# Altium footprint library Cole_.PcbLib: 167 footprints (part 3 of 11)
Each footprint in its own frame and in the unit in brackets; x right, y up, seen from the top. Pads: shape width x height; smd on the part's side, far side on the other; paste and mask are expansions set on the pad; w line width, h text height; cw(c..) or ccw(c..) is an arc to the next point about the centre after c.
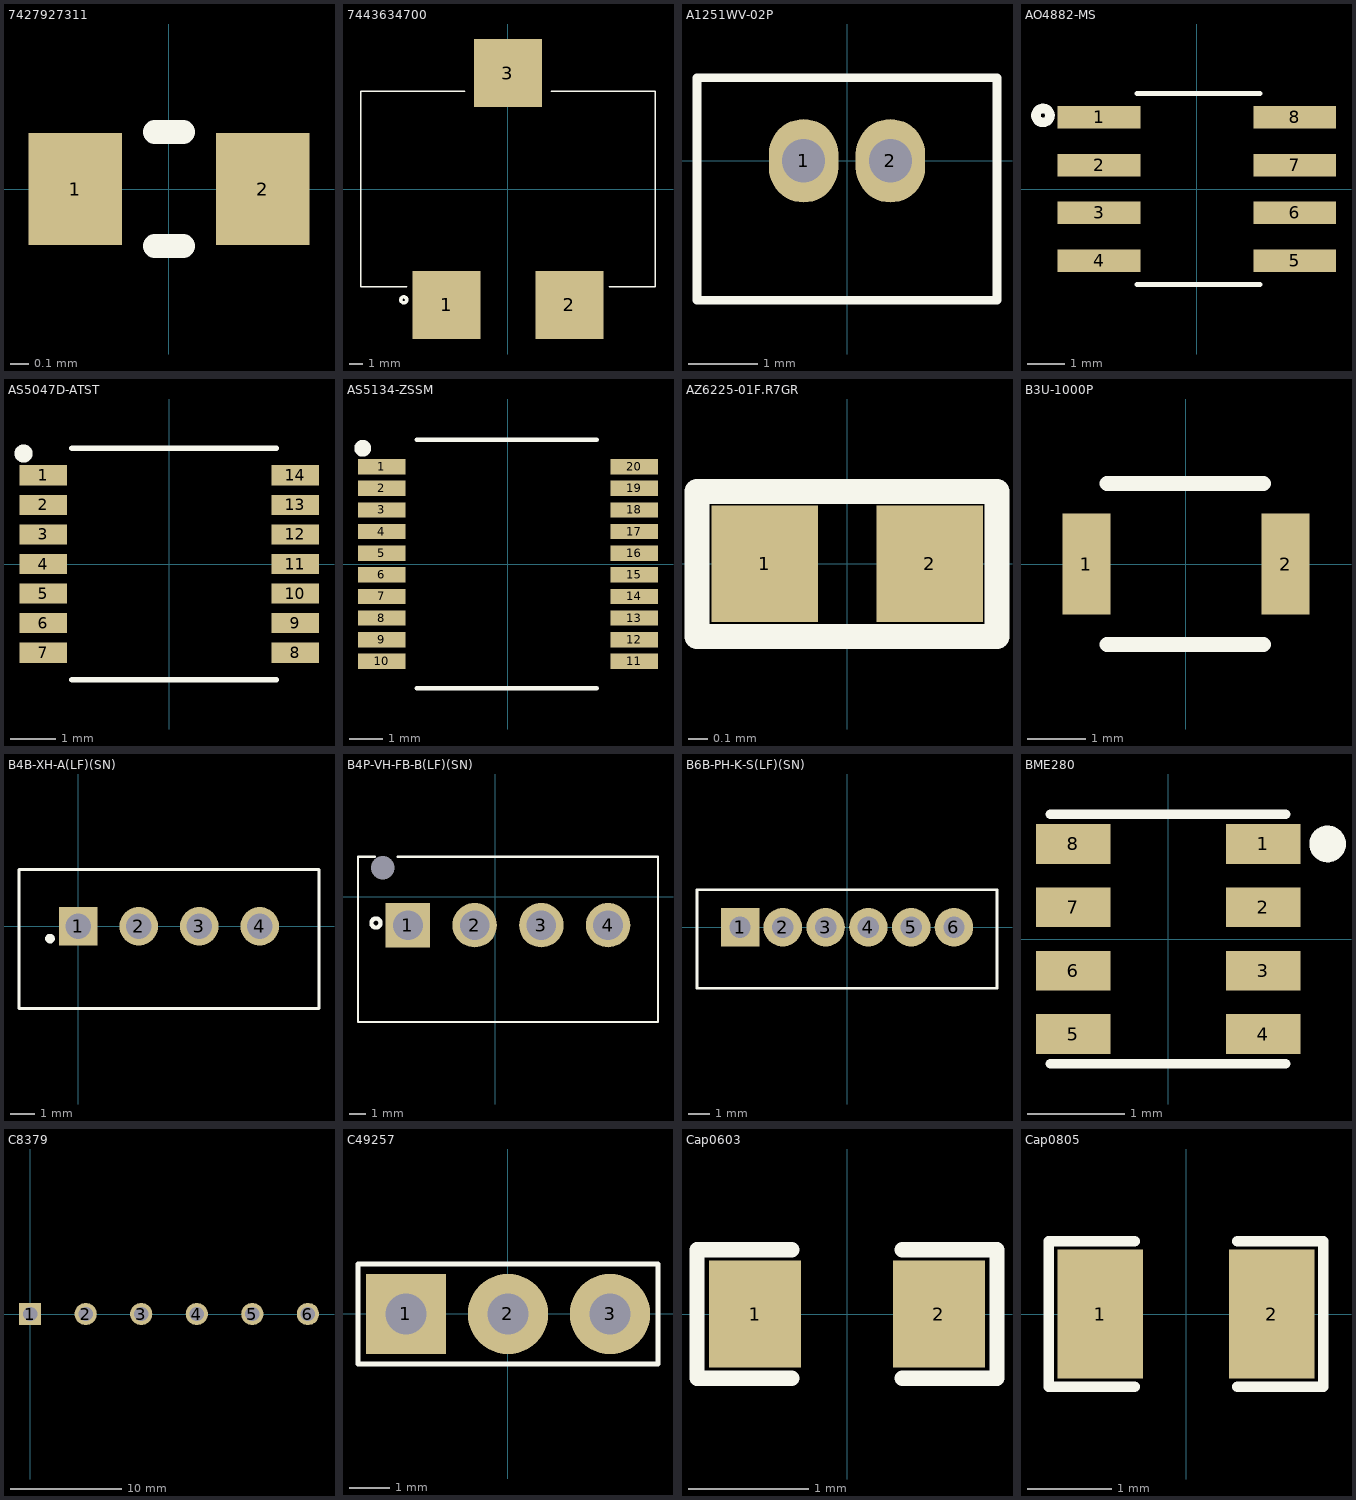
[diagram p2: the footprints below, top view; thin cyan lines are the x and y axes]

## 7427927311 [mm] "FERRITE BEAD 120 OHM 0402 1LN"
pads (2):
  rect 0.5x0.6 smd: 1(-0.5,0) 2(0.5,0)
Top Overlay:
  lines w0.127: -0.076,-0.305 0.076,-0.305 ; -0.076,0.305 0.076,0.305
3D body "74279270_Download_STP_WE-CBF-0402_rev1.stp": height 0.5, standoff 0, extent -0.5,-0.25 0.5,0.25

## 7443634700 [mm]
pads (3):
  rect 5x5 smd mask+0.06: 1(-4.5,-8.5) 2(4.5,-8.5) 3(0,8.5)
Top Overlay:
  circle w0.254: c-7.645,-8.128 r0.217
  lines w0.127: -7.442,-7.163 -10.795,-7.163 -10.795,7.163 -3.175,7.163 ; 3.175,7.163 10.795,7.163 10.795,-7.163 7.442,-7.163
3D body "7443630070_Download_STP_744363xxxx_rev1.stp": height 14, standoff 0, extent -10.75,-10.6 10.75,10.4

## A1251WV-02P [mm]
pads (2):
  oval 1x1.2 hole 0.62: 1(-0.625,0) 2(0.625,0)
Top Overlay:
  lines w0.127: -2.159,-2.007 2.159,-2.007 2.159,1.194 -2.159,1.194 -2.159,-2.007
3D body "A1251WV-02P.STEP": height 4.8, standoff -1.6, extent -2.125,-1.955 2.126,1.195

## AO4882-MS [mm]
pads (8):
  rect 2.2x0.6 smd: 1(-2.6,1.905) 2(-2.6,0.635) 3(-2.6,-0.635) 4(-2.6,-1.905) 5(2.6,-1.905) 6(2.6,-0.635) 7(2.6,0.635) 8(2.6,1.905)
Top Overlay:
  circle w0.254: c-4.09,1.956 r0.186
  lines w0.127: -1.6,-2.54 1.676,-2.54 ; -1.6,2.54 1.676,2.54
3D body "SOP-8L_DIO.step": height 1.75, standoff 0, extent -3.125,-2.475 3.125,2.475

## AS5047D-ATST [mm]
pads (14):
  rect 1.05x0.45 smd: 1(-2.775,1.95) 2(-2.775,1.3) 3(-2.775,0.65) 4(-2.775,0) 5(-2.775,-0.65) 6(-2.775,-1.3) 7(-2.775,-1.95) 8(2.775,-1.95) 9(2.775,-1.3) 10(2.775,-0.65) 11(2.775,0) 12(2.775,0.65) 13(2.775,1.3) 14(2.775,1.95)
Top Overlay:
  circle w0.2: c-3.207,2.433 r0.1
  lines w0.127: -2.14,-2.55 2.36,-2.55 ; -2.14,2.55 2.36,2.55
3D body "User Library-tssop14-2.step": height 1.2, standoff 0, extent -3.2,-2.55 3.2,2.55

## AS5134-ZSSM [mm]
pads (20):
  rect 1.43x0.46 smd: 1(-3.795,2.925) 2(-3.795,2.275) 3(-3.795,1.625) 4(-3.795,0.975) 5(-3.795,0.325) 6(-3.795,-0.325) 7(-3.795,-0.975) 8(-3.795,-1.625) 9(-3.795,-2.275) 10(-3.795,-2.925) 11(3.795,-2.925) 12(3.795,-2.275) 13(3.795,-1.625) 14(3.795,-0.975) 15(3.795,-0.325) 16(3.795,0.325) 17(3.795,0.975) 18(3.795,1.625) 19(3.795,2.275) 20(3.795,2.925)
Top Overlay:
  circle w0.254: c-4.369,3.48 r0.127
  lines w0.127: -2.743,-3.734 2.667,-3.734 ; -2.743,3.734 2.667,3.734
3D body "User Library-SSOP 20 PIN-1.step": height 1.95, standoff -0.04, extent -3.95,-3.665 3.95,3.665

## AZ6225-01F.R7GR [mm] "Bidirectional 2.5V 3.5V 5V 20A (8/20us) DFN1006P2E TVS RoHS"
pads (2):
  rect 0.55x0.6 smd: 1(-0.425,0) 2(0.425,0)
Top Overlay:
  lines w0.127: -0.775,-0.375 0.772,-0.375 0.772,0.372 -0.775,0.372 -0.775,-0.375
3D body "User Library-DFN1006-2.STEP": height 0.48, standoff -0.02, extent -0.5,-0.305 0.5,0.295

## B3U-1000P [mm] "SWITCH TACTILE SPST-NO 0.05A 12V"
pads (2):
  rect 0.82x1.72 smd: 1(-1.7,0) 2(1.7,0)
Top Overlay:
  lines w0.254: -1.346,-1.372 0,-1.372 1.321,-1.372 ; -1.346,1.372 0,1.372 1.321,1.372
3D body "User Library-OMRON B3U1000P.step": height 1.6, standoff 0, extent -2,-1.263 2,1.237

## B4B-XH-A(LF)(SN) [mm]
pads (4):
  rect 1.59x1.59 hole 1.06: 1(0,0)
  round 1.59 hole 1.06: 2(2.5,0) 3(5,0) 4(7.5,0)
Top Overlay:
  circle w0.2: c-1.168,-0.508 r0.1
  lines w0.127: -2.45,-3.4 9.95,-3.4 9.95,2.35 -2.45,2.35 -2.45,-3.4
3D body "step_temp.STEP": height 7, standoff -3.4, extent -2.45,-3.4 9.95,2.35

## B4P-VH-FB-B(LF)(SN) [mm] "CONN HEADER VERT 4POS 3.96MM"
pads (5):
  rect 2.64x2.64 hole 1.76: 1(-5.19,-1.7)
  round 2.64 hole 1.76: 2(-1.23,-1.7) 3(2.73,-1.7) 4(6.69,-1.7)
  round 0 hole 1.397 unplated: 20(-6.69,1.7)
Top Overlay:
  circle w0.254: c-7.087,-1.575 r0.27
  lines w0.127: -7.163,2.362 -8.153,2.362 -8.153,-7.442 9.653,-7.442 9.653,2.362 -5.791,2.362
3D body "b4p-vh-fb-b(lf)(sn) color.STEP": height 11, standoff -3.7, extent -8.123,-7.391 9.597,2.309

## B6B-PH-K-S(LF)(SN) [mm]
pads (6):
  rect 1.8x1.8 hole 1: 1(-5,0)
  round 1.8 hole 1: 2(-3,0) 3(-1,0) 4(1,0) 5(3,0) 6(5,0)
Top Overlay:
  lines w0.127: -7.01,-2.845 7.01,-2.845 7.01,1.753 -7.01,1.753 -7.01,-2.845
3D body "User Library-b6b-ph-ks.step": height 6, standoff -3, extent -6.95,-2.794 6.95,1.706

## BME280 [mm] "Humidity, Pressure, Temperature Sensor I²C Output"
pads (8):
  rect 0.762x0.406 smd: 1(0.975,0.975) 2(0.975,0.325) 3(0.975,-0.325) 4(0.975,-0.975) 5(-0.975,-0.975) 6(-0.975,-0.325) 7(-0.975,0.325) 8(-0.975,0.975)
Top Overlay:
  circle w0.203: c1.635,0.975 r0.087
  lines w0.102: -1.209,-1.28 1.204,-1.28 ; -1.209,1.28 1.204,1.28
3D body "User Library-Bosch_BME280.step": height 0.93, standoff 0, extent -1.25,-1.25 1.25,1.25

## C8379 [mm] "P=5.0mm Screw terminal RoHS"
pads (6):
  rect 2x2 hole 1.3: 1(0,0)
  round 2 hole 1.3: 2(5,0) 3(10,0) 4(15,0) 5(20,0) 6(25,0)

## C49257 [mm] "Pin Header 3 1 Straight,180degrees"
pads (3):
  rect 2x2 hole 1.02: 1(-2.54,0)
  round 2 hole 1.02: 2(0,0) 3(2.54,0)
Top Overlay:
  lines w0.127: -3.734,-1.245 -3.734,1.245 3.734,1.245 3.734,-1.245 -3.734,-1.245
3D body "70084952.stp": height 10.03, standoff -2.79, extent -3.66,-1.168 3.66,1.169

## Cap0603 [mil]
pads (2):
  rect 30x35 smd mask+2.36: 1(-30,0) 2(30,0)
Top Overlay:
  lines w5: -18,-21 -49,-21 -49,21 -18,21 ; 18,-21 49,-21 49,21 18,21
3D body "User Library-CAPC1608X09.step": height 34.25, standoff -1.18, extent -31.51,-15.75 31.49,15.74

## Cap0805 [mil] "SMD 0805"
pads (2):
  rect 40x60 smd mask+2.76: 1(-40,0) 2(40,0)
Top Overlay:
  lines w5: -24,-34 -64,-34 -64,34 -24,34 ; 24,-34 64,-34 64,34 24,34
3D body "User Library-0805 SMD Capacitor.step": height 30, standoff -0.79, extent -39.36,-24.6 39.38,24.61